# Altium footprint library BaseStation.PcbLib: 68 footprints (part 4 of 5)
Each footprint in its own frame and in the unit in brackets; x right, y up, seen from the top. Pads: shape width x height; smd on the part's side, far side on the other; paste and mask are expansions set on the pad; w line width, h text height; cw(c..) or ccw(c..) is an arc to the next point about the centre after c.
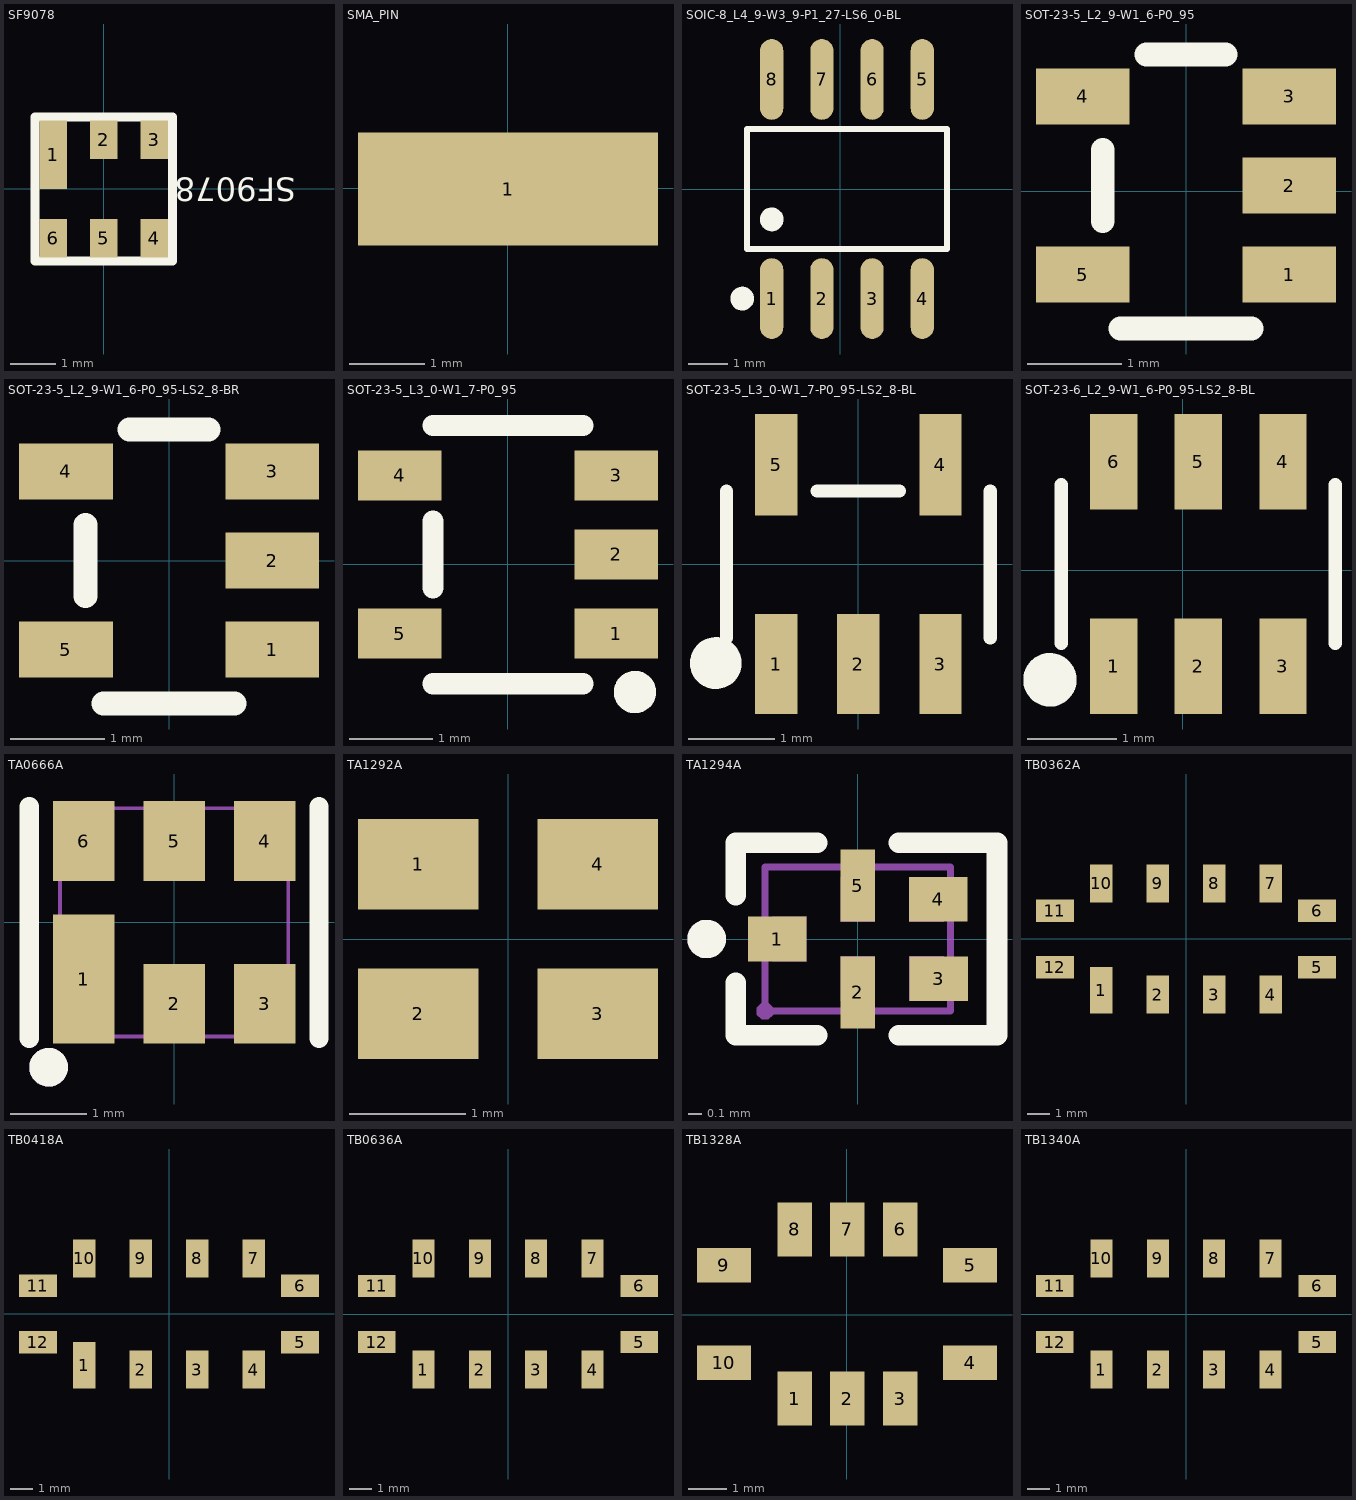
[diagram p3: the footprints below, top view; thin cyan lines are the x and y axes]

## SF9078 [mm] "SF9078"
pads (6):
  rect 0.6x1.5 smd: 1(-1.1,0.75)
  rect 0.6x0.85 smd: 2(0,1.075) 3(1.1,1.075) 4(1.1,-1.075) 5(0,-1.075) 6(-1.1,-1.075)
Top Overlay:
  lines w0.2: -1.5,-1.575 -1.5,1.575 1.5,1.575 1.5,-1.575 -1.5,-1.575
  text ".TOL" at 0,0 h1.91
  text ".PARTNO" at 0,0 h1.91
  text "SF9078" at 4.191,0.249 h0.51

## SMA_PIN [mm] "SMA_PIN"
pads (1):
  rect 4x1.5 smd: 1(0,-0.013)

## SOIC-8_L4_9-W3_9-P1_27-LS6_0-BL [mm] "SOIC-8_L4_9-W3_9-P1_27-LS6_0-BL"
pads (8):
  oval 0.588x2.045 smd: 1(-1.731,-2.772) 2(-0.461,-2.772) 3(0.809,-2.772) 4(2.079,-2.772) 5(2.079,2.773) 6(0.809,2.773) 7(-0.461,2.773) 8(-1.731,2.773)
Top Overlay:
  circle w0.3: c-1.731,-0.769 r0.15
  circle w0.3: c-2.477,-2.772 r0.15
  lines w0.152: -2.352,-1.521 -2.352,1.522 2.701,1.522 2.701,-1.521 -2.352,-1.521

## SOT-23-5_L2_9-W1_6-P0_95 [mm] "SOT-23-5_L2_9-W1_6-P0_95"
pads (5):
  rect 1x0.6 smd: 1(1.1,-0.886) 2(1.1,0.064) 3(1.1,1.014) 4(-1.1,1.014) 5(-1.1,-0.887)
Top Overlay:
  lines w0.254: -0.889,-0.318 -0.889,0.445 ; -0.699,-1.46 0.698,-1.46 ; -0.422,1.46 0.422,1.46

## SOT-23-5_L2_9-W1_6-P0_95-LS2_8-BR [mm] "SOT-23-5_L2_9-W1_6-P0_95-LS2_8-BR"
pads (5):
  rect 1x0.6 smd: 1(1.1,-0.95) 2(1.1,0) 3(1.1,0.95) 4(-1.1,0.95) 5(-1.1,-0.95)
Top Overlay:
  lines w0.254: -0.889,-0.381 -0.889,0.381 ; -0.699,-1.524 0.699,-1.524 ; -0.423,1.397 0.422,1.397

## SOT-23-5_L3_0-W1_7-P0_95 [mm] "SOT-23-5_L3_0-W1_7-P0_95"
pads (5):
  rect 1x0.6 smd: 1(1.3,-0.836) 2(1.3,0.114) 3(1.3,1.064) 4(-1.3,1.064) 5(-1.3,-0.836)
Top Overlay:
  circle w0.254: c1.524,-1.537 r0.127
  lines w0.254: -0.9,-1.436 0.9,-1.436 ; -0.9,-0.286 -0.9,0.514 ; -0.9,1.664 0.9,1.664

## SOT-23-5_L3_0-W1_7-P0_95-LS2_8-BL [mm] "SOT-23-5_L3_0-W1_7-P0_95-LS2_8-BL"
pads (5):
  rect 0.49x1.157 smd: 1(-0.95,-1.154) 2(0,-1.154) 3(0.95,-1.154)
  rect 0.49x1.175 smd: 4(0.95,1.154) 5(-0.95,1.154)
Top Overlay:
  circle w0.3: c-1.651,-1.143 r0.15
  lines w0.152: -1.526,-0.851 -1.526,0.851 ; -0.476,0.851 0.476,0.851 ; 1.526,-0.851 1.526,0.851

## SOT-23-6_L2_9-W1_6-P0_95-LS2_8-BL [mm] "SOT-23-6_L2_9-W1_6-P0_95-LS2_8-BL"
pads (6):
  rect 0.532x1.072 smd: 1(-0.774,-1.077) 2(0.176,-1.077) 3(1.126,-1.077) 4(1.126,1.221) 5(0.176,1.221) 6(-0.774,1.221)
Top Overlay:
  circle w0.3: c-1.492,-1.229 r0.15
  lines w0.152: -1.363,-0.817 -1.363,0.961 ; 1.716,-0.817 1.716,0.961

## TA0666A [mm]
pads (6):
  rect 0.81x1.7 smd: 1(-1.19,-0.745)
  rect 0.81x1.05 smd: 2(0,-1.07) 3(1.19,-1.07) 4(1.19,1.07) 5(0,1.07) 6(-1.19,1.07)
Top Overlay:
  circle w0.254: c-1.651,-1.905 r0.127
  lines w0.254: -1.905,-1.524 -1.905,1.524 ; 1.905,-1.524 1.905,1.524
Mechanical 2:
  circle w0.254: c-1.651,-1.905 r0.127
Mechanical 6:
  lines w0.051: -1.5,-1.5 1.5,-1.5 1.5,1.5 -1.5,1.5 -1.5,-1.5
Mechanical 8:
  region: -1.44,-1.525 -1.475,-1.56 -1.525,-1.56 -1.56,-1.525 -1.56,-1.475 -1.525,-1.44 -1.475,-1.44 -1.44,-1.475
Mechanical 9:
  region: -0.3,-0.645 0.3,-0.645 0.3,-1.495 -0.3,-1.495
  region: 0.89,-0.65 1.49,-0.65 1.49,-1.5 0.89,-1.5
  region: 0.89,1.495 1.49,1.495 1.49,0.645 0.89,0.645
  region: -0.3,1.495 0.3,1.495 0.3,0.645 -0.3,0.645
  region: -1.49,1.495 -0.89,1.495 -0.89,0.645 -1.49,0.645
  region: -1.49,0.005 -0.89,0.005 -0.89,-1.495 -1.49,-1.495

## TA1292A [mm]
pads (4):
  rect 1.04x0.78 smd: 1(-0.775,0.645) 2(-0.775,-0.645) 3(0.775,-0.645) 4(0.775,0.645)

## TA1294A [mm]
pads (5):
  rect 0.425x0.325 smd: 1(-0.588,0) 3(0.587,-0.288) 4(0.587,0.288)
  rect 0.25x0.525 smd: 2(0,-0.388) 5(0,0.388)
Top Overlay:
  circle w0.14: c-1.1,0 r0.07
  lines w0.15: -0.888,-0.318 -0.888,-0.7 -0.297,-0.7 ; -0.888,0.318 -0.888,0.7 -0.297,0.7 ; 0.297,-0.7 1.012,-0.7 1.012,0.7 0.297,0.7
Mechanical 2:
  circle w0.14: c-1.1,0 r0.07
Mechanical 6:
  lines w0.051: -0.675,-0.525 -0.675,0.525 0.675,0.525 0.675,-0.525 -0.675,-0.525
Mechanical 8:
  region: -0.615,-0.55 -0.65,-0.585 -0.7,-0.585 -0.735,-0.55 -0.735,-0.5 -0.7,-0.465 -0.65,-0.465 -0.615,-0.5
Mechanical 9:
  region: -0.375,0.163 -0.375,-0.162 -0.625,-0.162 -0.625,0.163
  region: -0.125,-0.125 0.125,-0.125 0.125,-0.45 -0.125,-0.45
  region: -0.125,0.451 0.125,0.451 0.125,0.126 -0.125,0.126
  region: 0.625,-0.451 0.375,-0.451 0.375,-0.126 0.625,-0.126
  region: 0.625,0.126 0.375,0.126 0.375,0.451 0.625,0.451

## TB0362A [mm]
pads (12):
  rect 1x2.1 smd: 1(-3.81,-2.3)
  rect 1x1.7 smd: 2(-1.27,-2.5) 3(1.27,-2.5) 4(3.81,-2.5) 7(3.81,2.5) 8(1.27,2.5) 9(-1.27,2.5) 10(-3.81,2.5)
  rect 1.7x1 smd: 5(5.9,-1.27) 6(5.9,1.27) 11(-5.9,1.27) 12(-5.9,-1.27)

## TB0418A [mm]
pads (12):
  rect 1x2.1 smd: 1(-3.81,-2.3)
  rect 1x1.7 smd: 2(-1.27,-2.5) 3(1.27,-2.5) 4(3.81,-2.5) 7(3.81,2.5) 8(1.27,2.5) 9(-1.27,2.5) 10(-3.81,2.5)
  rect 1.7x1 smd: 5(5.9,-1.27) 6(5.9,1.27) 11(-5.9,1.27) 12(-5.9,-1.27)

## TB0636A [mm]
pads (12):
  rect 0.99x1.7 smd: 1(-3.81,-2.5) 2(-1.27,-2.5) 3(1.27,-2.5) 4(3.81,-2.5) 7(3.81,2.5) 8(1.27,2.5) 9(-1.27,2.5) 10(-3.81,2.5)
  rect 1.7x0.99 smd: 5(5.905,-1.27) 6(5.905,1.27) 11(-5.905,1.27) 12(-5.905,-1.27)

## TB1328A [mm]
pads (10):
  rect 0.9x1.4 smd: 1(-1.35,-2.18) 2(0.02,-2.18) 3(1.39,-2.18) 6(1.39,2.22) 7(0.02,2.22) 8(-1.35,2.22)
  rect 1.4x0.9 smd: 4(3.21,-1.25) 5(3.21,1.29) 9(-3.19,1.29) 10(-3.19,-1.25)

## TB1340A [mm]
pads (12):
  rect 0.99x1.7 smd: 1(-3.81,-2.5) 2(-1.27,-2.5) 3(1.27,-2.5) 4(3.81,-2.5) 7(3.81,2.5) 8(1.27,2.5) 9(-1.27,2.5) 10(-3.81,2.5)
  rect 1.7x0.99 smd: 5(5.905,-1.27) 6(5.905,1.27) 11(-5.905,1.27) 12(-5.905,-1.27)